# Altium footprint library BUTTON.PcbLib: 2 footprints
Each footprint in its own frame and in the unit in brackets; x right, y up, seen from the top. Pads: shape width x height; smd on the part's side, far side on the other; paste and mask are expansions set on the pad; w line width, h text height; cw(c..) or ccw(c..) is an arc to the next point about the centre after c.
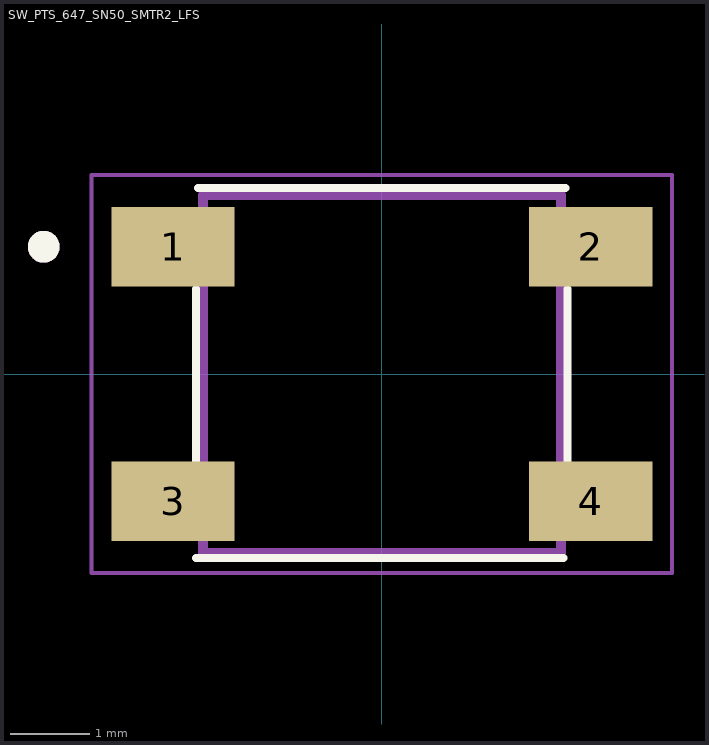
[diagram p0: the footprints below, top view; thin cyan lines are the x and y axes]

## PCBComponent_1 [mm]

## SW_PTS_647_SN50_SMTR2_LFS [mm]
height 5
pads (4):
  rect 1.55x1 smd: 1(-2.625,1.6) 2(2.625,1.6) 3(-2.625,-1.6) 4(2.625,-1.6)
Top Overlay:
  circle w0.2: c-4.25,1.6 r0.1
  lines w0.1: -2.337,-2.311 2.286,-2.311 ; -2.337,-1.092 -2.337,1.067 ; -2.311,2.337 2.311,2.337 ; 2.337,-1.092 2.337,1.067
Top Assembly:
  circle w0.2: c-4.25,1.6 r0.1
  lines w0.127: -2.25,-2.25 -2.25,2.25 2.25,2.25 2.25,-2.25 -2.25,-2.25
the flat projection:
  lines w0.05: -3.65,-2.5 3.65,-2.5 3.65,2.5 -3.65,2.5 -3.65,-2.5
3D body "step_temp.STEP": height 5, standoff 0, extent -3.25,-2.25 3.25,2.25